# Altium schematic symbol library 1N4148WS_R9G.SchLib: 1 symbol
Pins are listed as number, name and electrical type; pins without a type are passive.

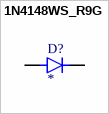
[diagram p0: symbol 1N4148WS_R9G]

## 1N4148WS_R9G
designator D?
150mA, 100V High Speed SMD Switching Diode; MF: Taiwan Semiconductor; MP: 1N4148WS R9G; SnapEDA_Link: https://www.snapeda.com/parts/1N4148WS%20R9G/Taiwan+Semiconductor/view-part/?ref=snap; Package: SOD-323F Taiwan Semiconductor; Value: *; Check_prices: https://www.snapeda.com/parts/1N4148WS%20R9G/Taiwan+Semiconductor/view-part/?ref=eda
footprint DIO_1N4148WS_R9G
pins: A, C K